# Altium schematic symbol library Clema_CAP.SchLib: 18 symbols
Pins are listed as number, name and electrical type; pins without a type are passive.

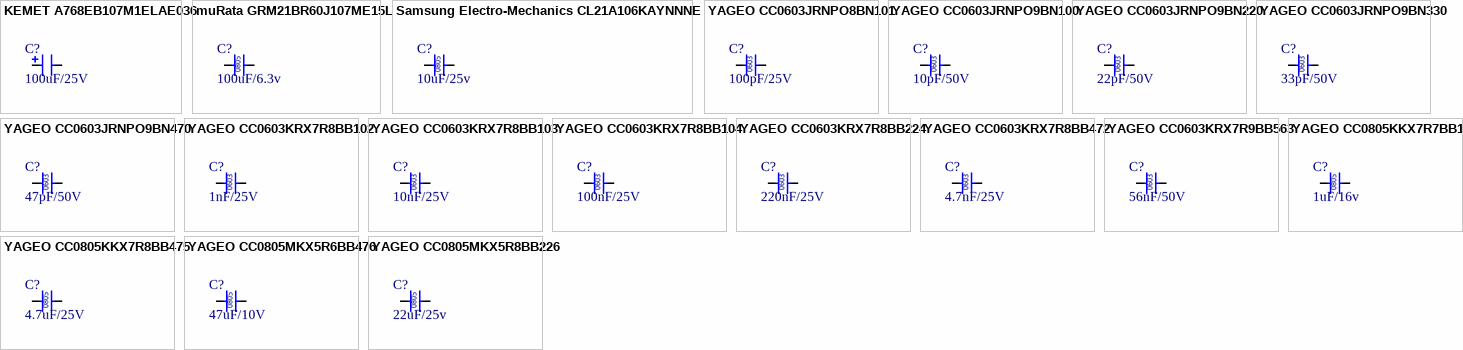
[diagram p0: symbols KEMET A768EB107M1ELAE036 to YAGEO CC0805MKX5R8BB226]

## KEMET A768EB107M1ELAE036
designator C?, comment 100uF/25V
CAP ALUM POLY 100uF ±20% 25V SMD; DigiKey Part Number: 399-A768EB107M1ELAE036TR-ND; LCSC Part Number: C1517619; Mouser Part Number: 80-A768EB107M1ELAE36; Package: SMD,D6.3xL6.0mm; Type: SMD
footprint CAP_SMD,D6.3xL7.7mm
pins: 1, 2

## muRata GRM21BR60J107ME15L
designator C?, comment 100uF/6.3v
CAP CER 100uF 6.3V X5R 0805; Manufacturer: muRata; Manufacturer Part Number: GRM21BR60J107ME15L; Type: SMD; DigiKey Part Number: 490-13981-2-ND; LCSC Part Number: C141660; Mouser Part Number: 81-GRM21BR60J107ME5L; Package: 0805
footprint CAP_0805
pins: 1, 2

## Samsung Electro-Mechanics CL21A106KAYNNNE
designator C?, comment 10uF/25v
CAP CER 10uF 25V X5R 0805; Manufacturer: Samsung Electro-Mechanics; Manufacturer Part Number: CC0805KKX7R6BB106; Type: SMD; LCSC Part Number: C15850; Package: 0805
footprint CAP_0805
pins: 1, 2

## YAGEO CC0603JRNPO8BN101
designator C?, comment 100pF/25V
CAP CER 100pF 25V NP0 0603; Manufacturer: YAGEO; Manufacturer Part Number: CC0603JRNPO8BN101; Type: SMD; DigiKey Part Number: 311-3949-2-ND; LCSC Part Number: C519387; Mouser Part Number: 603-CC603JRNPO8BN101; Package: 0603
footprint CAP_0603
pins: 1, 2

## YAGEO CC0603JRNPO9BN100
designator C?, comment 10pF/50V
CAP CER 10pF 50V NP0 0603; Manufacturer: YAGEO; Manufacturer Part Number: CC0603JRNPO9BN100; Type: SMD; LCSC Part Number: C106245; Mouser Part Number: 603-C0603JRNPO9BN100; Package: 0603
footprint CAP_0603
pins: 1, 2

## YAGEO CC0603JRNPO9BN220
designator C?, comment 22pF/50V
CAP CER 22pF 50V NP0 0603; Manufacturer: YAGEO; Manufacturer Part Number: CC0603JRNPO9BN220; Type: SMD; DigiKey Part Number: 311-1062-2-ND; LCSC Part Number: C105620; Mouser Part Number: 603-CC603JRNPO9BN220; Package: 0603
footprint CAP_0603
pins: 1, 2

## YAGEO CC0603JRNPO9BN330
designator C?, comment 33pF/50V
CAP CER 33pF 50V NP0 0603; Manufacturer: YAGEO; Manufacturer Part Number: CC0603JRNPO9BN330; Type: SMD; DigiKey Part Number: 311-1064-2-ND; LCSC Part Number: C107047; Mouser Part Number: 603-C0603JRNPO9BN330; Package: 0603
footprint CAP_0603
pins: 1, 2

## YAGEO CC0603JRNPO9BN470
designator C?, comment 47pF/50V
CAP CER 47pF 50V NP0 0603; Manufacturer: YAGEO; Manufacturer Part Number: CC0603JRNPO9BN470; Type: SMD; DigiKey Part Number: 311-1065-2-ND; LCSC Part Number: C105622; Mouser Part Number: 603-CC603JRNPO9BN470; Package: 0603
footprint CAP_0603
pins: 1, 2

## YAGEO CC0603KRX7R8BB102
designator C?, comment 1nF/25V
CAP CER 1nF 25V X7R 0603; Manufacturer: YAGEO; Manufacturer Part Number: CC0603KRX7R8BB102; Type: SMD; LCSC Part Number: C519404; Mouser Part Number: 603-CC603KRX7R8BB102; Package: 0603
footprint CAP_0603
pins: 1, 2

## YAGEO CC0603KRX7R8BB103
designator C?, comment 10nF/25V
CAP CER 10nF 25V X7R 0603; Manufacturer: YAGEO; Manufacturer Part Number: CC0603KRX7R8BB103; Type: SMD; DigiKey Part Number: 311-1360-2-ND; LCSC Part Number: C327204; Mouser Part Number: 603-CC603KRX7R8BB103; Package: 0603
footprint CAP_0603
pins: 1, 2

## YAGEO CC0603KRX7R8BB104
designator C?, comment 100nF/25V
CAP CER 100nF 25V X7R 0603; Manufacturer: YAGEO; Manufacturer Part Number: CC0603KRX7R8BB104; Type: SMD; DigiKey Part Number: 311-1341-2-ND; LCSC Part Number: C92490; Mouser Part Number: 603-CC603KPX7R8BB104; Package: 0603
footprint CAP_0603
pins: 1, 2

## YAGEO CC0603KRX7R8BB224
designator C?, comment 220nF/25V
CAP CER 220nF 25V X7R 0603; Manufacturer: YAGEO; Manufacturer Part Number: CC0603KRX7R8BB224; Type: SMD; DigiKey Part Number: 311-1803-2-ND; LCSC Part Number: C106857; Mouser Part Number: 603-CC603KRX7R8BB224; Package: 0603
footprint CAP_0603
pins: 1, 2

## YAGEO CC0603KRX7R8BB472
designator C?, comment 4.7nF/25V
CAP CER 4.7nF 25V X7R 0603; Manufacturer: YAGEO; Manufacturer Part Number: CC0603KRX7R8BB472; Type: SMD; DigiKey Part Number: 311-4088-2-ND; LCSC Part Number: C505480; Mouser Part Number: 603-CC603KRX7R8BB472; Package: 0603
footprint CAP_0603
pins: 1, 2

## YAGEO CC0603KRX7R9BB563
designator C?, comment 56nF/50V
CAP CER 56nF 50V X7R 0603; Manufacturer: YAGEO; Manufacturer Part Number: CC0603KRX7R9BB563; Type: SMD; DigiKey Part Number: 311-4100-2-ND; LCSC Part Number: C282072; Mouser Part Number: 603-CC603KRX7R9BB563; Package: 0603
footprint CAP_0603
pins: 1, 2

## YAGEO CC0805KKX7R7BB105
designator C?, comment 1uF/16v
CAP CER 1uF 16V X7R 0805; Manufacturer: YAGEO; Manufacturer Part Number: CC0805KKX7R7BB105; Type: SMD; DigiKey Part Number: 311-1365-2-ND; LCSC Part Number: C94122; Mouser Part Number: 603-CC805KKX7R7BB105; Package: 0805
footprint CAP_0805
pins: 1, 2

## YAGEO CC0805KKX7R8BB475
designator C?, comment 4.7uF/25V
CAP CER 4.7uF 25V X7R 0805; Manufacturer: YAGEO; Manufacturer Part Number: CC0805KKX7R8BB475; Type: SMD; LCSC Part Number: C354262; Package: 0805
footprint CAP_0805
pins: 1, 2

## YAGEO CC0805MKX5R6BB476
designator C?, comment 47uF/10V
CAP CER 47uF 10V X5R 0805; Manufacturer: YAGEO; Manufacturer Part Number: CC0805MKX5R6BB476; Type: SMD; LCSC Part Number: C2179580; Mouser Part Number: 603-CC0805MKX56BB476; Package: 0805
footprint CAP_0805
pins: 1, 2

## YAGEO CC0805MKX5R8BB226
designator C?, comment 22uF/25v
CAP CER 22uF 25V X5R 0805; Manufacturer: YAGEO; Manufacturer Part Number: CC0805MKX5R8BB226; Type: SMD; DigiKey Part Number: 311-1903-2-ND; LCSC Part Number: C784585; Mouser Part Number: 603-CC805MKX5R8BB226; Package: 0805
footprint CAP_0805
pins: 1, 2